# Altium schematic symbol library Capacitor.SchLib: 735 symbols (part 20 of 20)
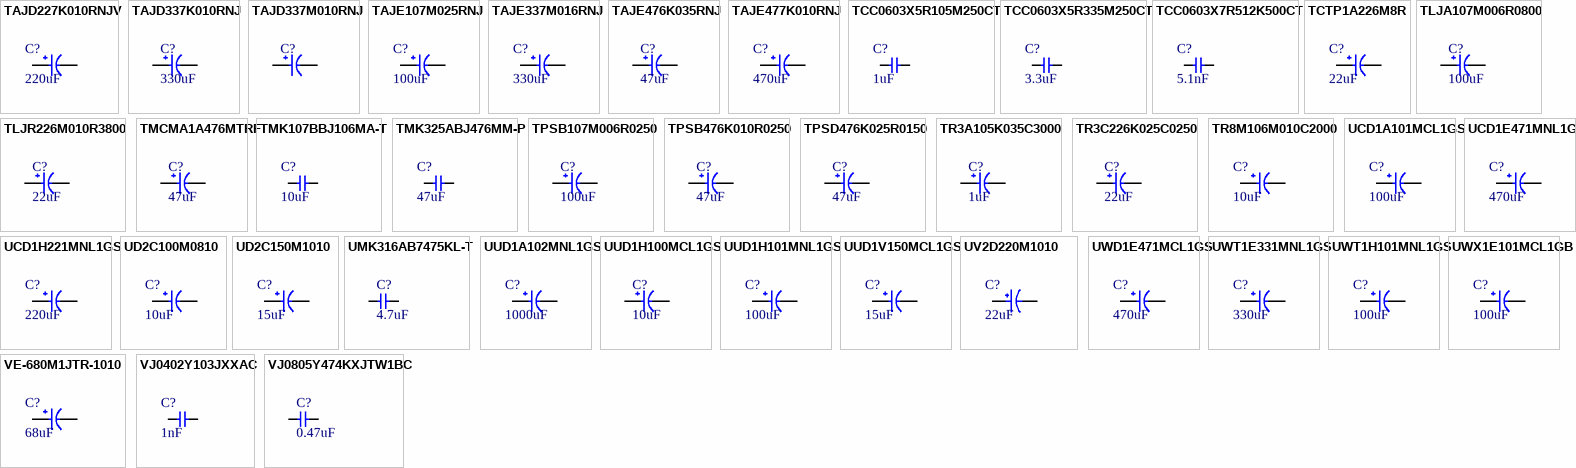
[diagram p37: symbols TAJD227K010RNJV to VJ0805Y474KXJTW1BC]

## UUD1H101MNL1GS
designator C?, comment 100uF
CAP ALUM 100UF 20% 50V SMD; Manufacturer: Nichicon; Manufacturer Part Number: UUD1H101MNL1GS; Dielectric Material: Aluminium; Ripple Current: 300mA; Life (Hours): 5000Hour; Impedance: 340mR; Leakage Current: 3uA; Dissipation Factor: 0.14%; Lead Diameter: 1.1mm; Item Type: Capacitor; Supplier 1: Digi-Key; RoHS: Yes; Category: Aluminum Electrolytic Capacitors; Pricing 1: 1=0.62000, 10=0.44000, 50=0.33300, 100=0.29000 (USD); Case/Package: Radial; Number of Pins: 2; Min Operating Temperature: -55°C; Max Operating Temperature: 105°C; Tolerance: 20%; Capacitance: 100uF; Ripple Current (AC): 300mA; Voltage Rating (DC): 50V; Package Quantity: 500; Packaging: Tape and Reel; Voltage Rating: 50V; Termination: SMD/SMT; Voltage: 50V; Series: UD; Construction: Cylindrical; Diameter: 8mm; Length: 10mm; Height: 10mm; Lead Pitch: 3.1mm; Height - Seated (Max): 0.394inch; Radiation Hardening: No; REACH SVHC: No SVHC; Lead Free: Lead Free; RoHS Compliant: Yes; ComponentLink1URL: https://datasheet.ciiva.com/6002/66055-6002224.pdf?src-supplier=Farnell; ComponentLink1Description: https://datasheet.ciiva.com/6002/66055-6002224.pdf?src-supplier=Farnell; ComponentLink2URL: https://datasheet.ciiva.com/11781/0900766b80fa39e7-11781901.pdf?src-supplier=RSComponents; ComponentLink2Description: https://datasheet.ciiva.com/11781/0900766b80fa39e7-11781901.pdf?src-supplier=RSComponents; ComponentLink3URL: https://datasheet.ciiva.com/97/e-ud-97939.pdf?src-supplier=Digi-Key; ComponentLink3Description: https://datasheet.ciiva.com/97/e-ud-97939.pdf?src-supplier=Digi-Key; ComponentLink4URL: https://datasheet.ciiva.com/97/e-ud-97940.pdf?src-supplier=Digi-Key; ComponentLink4Description: https://datasheet.ciiva.com/97/e-ud-97940.pdf?src-supplier=Digi-Key; ComponentLink5URL: https://datasheet.ciiva.com/97/e-ud-97941.pdf?src-supplier=Digi-Key; ComponentLink5Description: https://datasheet.ciiva.com/97/e-ud-97941.pdf?src-supplier=Digi-Key; ComponentLink6URL: https://datasheet.ciiva.com/28458/e-ud-28458117.pdf?src-supplier=Element14; ComponentLink6Description: https://datasheet.ciiva.com/28458/e-ud-28458117.pdf?src-supplier=Element14; ComponentLink7URL: https://datasheet.ciiva.com/28458/1910936-28458133.pdf?src-supplier=Element14; ComponentLink7Description: https://datasheet.ciiva.com/28458/1910936-28458133.pdf?src-supplier=Element14; ComponentLink8URL: https://datasheet.ciiva.com/5362/e-ud-5362134.pdf?src-supplier=Mouser; ComponentLink8Description: https://datasheet.ciiva.com/5362/e-ud-5362134.pdf?src-supplier=Mouser; ComponentLink9URL: https://datasheet.ciiva.com/7781/66055-7781450.pdf?src-supplier=Element14; ComponentLink9Description: https://datasheet.ciiva.com/7781/66055-7781450.pdf?src-supplier=Element14; ComponentLink10URL: https://datasheet.ciiva.com/17354/e-ud-17354671.pdf?src-supplier=Avnet+Europe; ComponentLink10Description: https://datasheet.ciiva.com/17354/e-ud-17354671.pdf?src-supplier=Avnet+Europe; Supplier Part Number 1: 493-2306-6-ND; LCSC Part Number: C116241
footprint UUD-100uF-8mmDia (0.327" L x 0.327" W (8.30mm x 8.30mm))
pins: 1, 2

## UUD1V150MCL1GS
designator C?, comment 15uF
CAP ALUM 15UF 20% 35V SMD; Manufacturer: Nichicon; Manufacturer Part Number: UUD1V150MCL1GS; Dielectric Material: Aluminium; Ripple Current: 150mA; Impedance: 760mR; Leakage Current: 5.25uA; Life (Hours): 2000Hour; Item Type: Capacitor; Supplier 1: Arrow Electronics; RoHS: Yes; Category: Aluminum Electrolytic Capacitors; Stock 1: 1; Pricing 1: 1=0.1001 (USD); Case/Package: Radial; Pins: 2; Min Operating Temperature: -55°C; Max Operating Temperature: 105°C; Package Quantity: 1000; Voltage Rating (DC): 35V; Tolerance: 20%; Packaging: Tape and Reel; Value: 15uF; Voltage Rating: 35V; Termination: SMD/SMT; Series: UD; Construction: Cylindrical; Diameter: 5mm; Length: 5.8mm; Height: 5.8mm; Radiation Hardening: No; Lead Free: Lead Free; RoHS Compliant: Yes; ComponentLink1URL: https://datasheet.ciiva.com/96/e-ud-96810.pdf?src-supplier=Digi-Key; ComponentLink1Description: https://datasheet.ciiva.com/96/e-ud-96810.pdf?src-supplier=Digi-Key; ComponentLink2URL: https://datasheet.ciiva.com/96/e-ud-96811.pdf?src-supplier=Digi-Key; ComponentLink2Description: https://datasheet.ciiva.com/96/e-ud-96811.pdf?src-supplier=Digi-Key; ComponentLink3URL: https://datasheet.ciiva.com/96/e-ud-96812.pdf?src-supplier=Digi-Key; ComponentLink3Description: https://datasheet.ciiva.com/96/e-ud-96812.pdf?src-supplier=Digi-Key; Supplier Part Number 1: UUD1V150MCL1GS; LCSC Part Number: C445253
footprint UUD1V150MCL1GS
pins: 1, 2

## UV2D220M1010
designator C?, comment 22uF
22uF 200V ±20% SMD,D10xL10.2mm Aluminum Electrolytic Capacitors - SMD ROHS; Manufacturer: Honor Elec; Manufacturer Part Number: UV2D220M1010; ComponentLink1URL: https://www.lcsc.com/product-detail/Aluminum-Electrolytic-Capacitors-SMD_Honor-Elec-UV2D220M1010_C88689.html; ComponentLink1Description: LCSC; LCSC Part Number: C88689; Item Type: Capacitor; Package: SMD 10*10.2mm
footprint UV2D220M1010
pins: 1, 2

## UWD1E471MCL1GS
designator C?, comment 470uF
CAP ALUM 470UF 20% 25V SMD; Manufacturer: Nichicon; Manufacturer Part Number: UWD1E471MCL1GS; Material: Aluminium; Ripple Current: 670mA; Impedance: 90mR; Leakage Current: 52.8uA; Life (Hours): 5000Hour; Dissipation Factor: 0.16%; Item Type: Capacitor; Supplier 1: Digi-Key; RoHS: Yes; Category: Aluminum Electrolytic Capacitors; Pricing 1: 1=0.87000, 10=0.64000, 50=0.51200, 100=0.43880 (USD); Mount: Surface Mount; Case/Package: SMD/SMT; Contact Plating: Tin; Min Operating Temperature: -55°C; Max Operating Temperature: 105°C; Capacitance: 470uF; Tolerance: 20%; Package Quantity: 1; Voltage Rating: 25V; Packaging: Tape and Reel; Voltage Rating (DC): 25V; Termination: SMD/SMT; Voltage: 25V; Features: General Purpose; Series: WD; Construction: Cylindrical; Diameter: 10mm; Length: 10mm; Height: 10mm; Height - Seated (Max): 0.394inch; Lead Pitch: 4.5mm; Radiation Hardening: No; Lead Free: Lead Free; RoHS Compliant: Yes; ComponentLink1URL: https://datasheet.ciiva.com/11783/0900766b8080ae55-11783126.pdf?src-supplier=RSComponents; ComponentLink1Description: https://datasheet.ciiva.com/11783/0900766b8080ae55-11783126.pdf?src-supplier=RSComponents; ComponentLink2URL: https://datasheet.ciiva.com/17523/e-wd-17523158.pdf?src-supplier=Avnet+Europe; ComponentLink2Description: https://datasheet.ciiva.com/17523/e-wd-17523158.pdf?src-supplier=Avnet+Europe; ComponentLink3URL: https://datasheet.ciiva.com/11684/e-wd-11684711.pdf?src-supplier=Avnet; ComponentLink3Description: https://datasheet.ciiva.com/11684/e-wd-11684711.pdf?src-supplier=Avnet; ComponentLink4URL: https://datasheet.ciiva.com/5362/e-wd-5362606.pdf?src-supplier=Mouser; ComponentLink4Description: https://datasheet.ciiva.com/5362/e-wd-5362606.pdf?src-supplier=Mouser; ComponentLink5URL: https://datasheet.ciiva.com/16512/e-wd-16512734.pdf?src-supplier=Future+Electronics; ComponentLink5Description: https://datasheet.ciiva.com/16512/e-wd-16512734.pdf?src-supplier=Future+Electronics; ComponentLink6URL: https://datasheet.ciiva.com/15036/e-wd-15036959.pdf?src-supplier=Digi-Key; ComponentLink6Description: https://datasheet.ciiva.com/15036/e-wd-15036959.pdf?src-supplier=Digi-Key; ComponentLink7URL: https://datasheet.ciiva.com/41751/404632-da-01-en-smd-aluminium-kondensator-470uf-25v-41751238.pdf?src-supplier=Conrad; ComponentLink7Description: https://datasheet.ciiva.com/41751/404632-da-01-en-smd-aluminium-kondensator-470uf-25v-41751238.pdf?src-supplier=Conrad; Supplier Part Number 1: 493-9671-1-ND; LCSC Part Number: C251022
footprint UWD-470uF-10mmDia (0.406" L x 0.406" W (10.30mm x 10.30mm))
pins: 1, 2

## UWT1E331MNL1GS
designator C?, comment 330uF
CAP ALUM 330UF 20% 25V SMD; Manufacturer: Nichicon; Manufacturer Part Number: UWT1E331MNL1GS; Item Type: Capacitor; Dielectric Material: 158ConductorMaterial; Polarity: 5066Direction; Supplier: Digikey; LCSC Part Number: C445067; RoHS: Yes; Stock: 31265; Pricing: 1=0.53, 10=0.353, 50=0.2762, 100=0.2506 (USD); Pins: 2NUMBER; Lead Free: 5697LeadFree; ComponentLink1URL: https://datasheet.ciiva.com/30522/getdatasheetpartid-457641-30522227.pdf?src-supplier=Verical; ComponentLink1Description: https://datasheet.ciiva.com/30522/getdatasheetpartid-457641-30522227.pdf?src-supplier=Verical; ComponentLink2URL: https://datasheet.ciiva.com/97/e-wt-97107.pdf?src-supplier=Digikey; ComponentLink2Description: https://datasheet.ciiva.com/97/e-wt-97107.pdf?src-supplier=Digikey; ComponentLink3URL: https://datasheet.ciiva.com/97/e-wt-97108.pdf?src-supplier=Digikey; ComponentLink3Description: https://datasheet.ciiva.com/97/e-wt-97108.pdf?src-supplier=Digikey; ComponentLink4URL: https://datasheet.ciiva.com/97/e-wt-97109.pdf?src-supplier=Digikey; ComponentLink4Description: https://datasheet.ciiva.com/97/e-wt-97109.pdf?src-supplier=Digikey; ComponentLink5URL: https://datasheet.ciiva.com/11782/0900766b80649b51-11782007.pdf?src-supplier=Rs; ComponentLink5Description: https://datasheet.ciiva.com/11782/0900766b80649b51-11782007.pdf?src-supplier=Rs; ComponentLink6URL: https://datasheet.ciiva.com/11686/e-wt-11686502.pdf?src-supplier=Avnet; ComponentLink6Description: https://datasheet.ciiva.com/11686/e-wt-11686502.pdf?src-supplier=Avnet; ComponentLink7URL: https://datasheet.ciiva.com/7851/e-wt-7851757.pdf?src-supplier=Element14; ComponentLink7Description: https://datasheet.ciiva.com/7851/e-wt-7851757.pdf?src-supplier=Element14; ComponentLink8URL: https://datasheet.ciiva.com/16502/e-wt-16502936.pdf?src-supplier=Future+Electronics; ComponentLink8Description: https://datasheet.ciiva.com/16502/e-wt-16502936.pdf?src-supplier=Future+Electronics
footprint UWT1E331MNL1GS
pins: 1, 2

## UWT1H101MNL1GS
designator C?, comment 100uF
CAP ALUM 100UF 20% 50V SMD; Manufacturer: Nichicon; Manufacturer Part Number: UWT1H101MNL1GS; Dielectric Material: Aluminium; Ripple Current: 140mA; Leakage Current: 3uA; Life (Hours): 1000Hour; Dissipation Factor: 0.14%; Item Type: Capacitor; Supplier 1: Digi-Key; Stock 1: 24169; Pricing 1: 1=0.57, 10=0.405, 50=0.3058, 100=0.2664 (USD); Mount: Surface Mount; Case/Package: Radial; Number of Pins: 2; Min Operating Temperature: -55°C; Max Operating Temperature: 105°C; Capacitance: 100uF; Tolerance: 20%; Package Quantity: 500; Voltage Rating: 50V; Packaging: Tape and Reel; Ripple Current (AC): 140mA; Voltage Rating (DC): 50V; Termination: SMD/SMT; Voltage: 50V; Series: WT; Construction: Cylindrical; Diameter: 8mm; Length: 10mm; Height: 10mm; Height - Seated (Max): 0.413inch; Radiation Hardening: No; REACH SVHC: No SVHC; Lead Free: Lead Free; RoHS Compliant: Yes; ComponentLink1URL: http://www.farnell.com/datasheets/2100058.pdf?src-supplier=Element14; ComponentLink1Description: http://www.farnell.com/datasheets/2100058.pdf?src-supplier=Element14; ComponentLink2URL: http://www.farnell.com/datasheets/2576809.pdf?src-supplier=Element14; ComponentLink2Description: http://www.farnell.com/datasheets/2576809.pdf?src-supplier=Element14; ComponentLink3URL: http://www.nichicon.co.jp/english/products/pdfs/e-ch_ref.pdf?src-supplier=Digi-Key; ComponentLink3Description: http://www.nichicon.co.jp/english/products/pdfs/e-ch_ref.pdf?src-supplier=Digi-Key; ComponentLink4URL: http://www.mouser.com/ds/2/293/e-wt-30307.pdf?src-supplier=Mouser; ComponentLink4Description: http://www.mouser.com/ds/2/293/e-wt-30307.pdf?src-supplier=Mouser; ComponentLink5URL: http://uk.rs-online.com/webdocs/13ec/0900766b813ecfdc.pdf?src-supplier=RSComponents; ComponentLink5Description: http://uk.rs-online.com/webdocs/13ec/0900766b813ecfdc.pdf?src-supplier=RSComponents; ComponentLink6URL: http://www.nichicon.co.jp/english/products/pdfs/e-wt.pdf?src-supplier=Avnet; ComponentLink6Description: http://www.nichicon.co.jp/english/products/pdfs/e-wt.pdf?src-supplier=Avnet; ComponentLink7URL: http://products.nichicon.co.jp/en/pdf/XJA043/e-wt.pdf?src-supplier=Future+Electronics; ComponentLink7Description: http://products.nichicon.co.jp/en/pdf/XJA043/e-wt.pdf?src-supplier=Future+Electronics; ComponentLink8URL: http://www.nichicon.co.jp/english/products/pdfs/e-wt.pdf?src-supplier=Avnet+Europe; ComponentLink8Description: http://www.nichicon.co.jp/english/products/pdfs/e-wt.pdf?src-supplier=Avnet+Europe; Supplier Part Number 1: 493-2226-1-ND; LCSC Part Number: C445063
footprint UWT1H101MNL1GS_
pins: 1, 2

## UWX1E101MCL1GB
designator C?, comment 100uF
CAP ALUM 100UF 20% 25V SMD; Manufacturer: Nichicon; Manufacturer Part Number: UWX1E101MCL1GB; Dielectric Material: Aluminium; Ripple Current: 110mA; Polarity: Polar; Leakage Current: 3uA; Life (Hours): 2000Hour; Dissipation Factor: 0.14%; Lead Diameter: 0.8mm; Item Type: Capacitor; Supplier 1: Digi-Key; Stock 1: 30613; Pricing 1: 1=0.43, 10=0.301, 50=0.211, 100=0.1808, 500=0.13558 (USD); Mount: Surface Mount; Case/Package: Radial; Number of Pins: 2; Weight: 0.01lb; Min Operating Temperature: -40°C; Max Operating Temperature: 85°C; Capacitance: 100uF; Tolerance: 20%; Ripple Current (AC): 110mA; Voltage Rating: 25V; Packaging: Tape and Reel; Package Quantity: 1000; Voltage Rating (DC): 25V; Termination: SMD/SMT; Voltage: 25V; Series: WX; Construction: Cylindrical; Diameter: 8mm; Length: 5.4mm; Width: 0.25inch; Height: 5.4mm; Lead Pitch: 2.3mm; Height - Seated (Max): 0.213inch; Radiation Hardening: No; REACH SVHC: No SVHC; Lead Free: Lead Free; RoHS Compliant: Yes; ComponentLink1URL: http://nichicon-us.com/english/products/pdfs/e-uwx.pdf?src-supplier=Digi-Key; ComponentLink1Description: http://nichicon-us.com/english/products/pdfs/e-uwx.pdf?src-supplier=Digi-Key; ComponentLink2URL: http://www.nichicon.co.jp/english/products/pdfs/e-ch_ref.pdf?src-supplier=Mouser; ComponentLink2Description: http://www.nichicon.co.jp/english/products/pdfs/e-ch_ref.pdf?src-supplier=Mouser; ComponentLink3URL: http://www.nichicon.co.jp/english/products/pdfs/e-wx.pdf?src-supplier=Avnet; ComponentLink3Description: http://www.nichicon.co.jp/english/products/pdfs/e-wx.pdf?src-supplier=Avnet; ComponentLink4URL: http://uk.rs-online.com/webdocs/0fa3/0900766b80fa3a90.pdf?src-supplier=RSComponents; ComponentLink4Description: http://uk.rs-online.com/webdocs/0fa3/0900766b80fa3a90.pdf?src-supplier=RSComponents; ComponentLink5URL: http://nichicon-us.com/english/products/pdfs/e-wx.pdf?src-supplier=Future+Electronics; ComponentLink5Description: http://nichicon-us.com/english/products/pdfs/e-wx.pdf?src-supplier=Future+Electronics; ComponentLink6URL: http://www.nichicon.co.jp/english/products/pdfs/e-ch_ref.pdf?src-supplier=Avnet+Europe; ComponentLink6Description: http://www.nichicon.co.jp/english/products/pdfs/e-ch_ref.pdf?src-supplier=Avnet+Europe; ComponentLink7URL: http://www.farnell.com/datasheets/2364658.pdf?src-supplier=Element14; ComponentLink7Description: http://www.farnell.com/datasheets/2364658.pdf?src-supplier=Element14; Supplier Part Number 1: 493-2113-6-ND; Supplier 2: Digi-Key; RoHS: Yes; Category: Aluminum Electrolytic Capacitors; Stock 2: 25010; Pricing 2: 1=0.43000, 10=0.30100, 50=0.21100, 100=0.18080, 500=0.13558 (USD); ComponentLink8URL: https://datasheet.ciiva.com/11778/0900766b80fa3a90-11778418.pdf?src-supplier=RSComponents; ComponentLink8Description: https://datasheet.ciiva.com/11778/0900766b80fa3a90-11778418.pdf?src-supplier=RSComponents; ComponentLink9URL: https://datasheet.ciiva.com/17527/e-wx-17527624.pdf?src-supplier=Avnet+Europe; ComponentLink9Description: https://datasheet.ciiva.com/17527/e-wx-17527624.pdf?src-supplier=Avnet+Europe; ComponentLink10URL: https://datasheet.ciiva.com/5361/e-wx-11809-5361100.pdf?src-supplier=Mouser; ComponentLink10Description: https://datasheet.ciiva.com/5361/e-wx-11809-5361100.pdf?src-supplier=Mouser; ComponentLink11URL: https://datasheet.ciiva.com/28458/1912851-28458684.pdf?src-supplier=Element14; ComponentLink11Description: https://datasheet.ciiva.com/28458/1912851-28458684.pdf?src-supplier=Element14; ComponentLink12URL: https://datasheet.ciiva.com/96/e-wx-96650.pdf?src-supplier=Digi-Key; ComponentLink12Description: https://datasheet.ciiva.com/96/e-wx-96650.pdf?src-supplier=Digi-Key; ComponentLink13URL: https://datasheet.ciiva.com/96/e-wx-96651.pdf?src-supplier=Digi-Key; ComponentLink13Description: https://datasheet.ciiva.com/96/e-wx-96651.pdf?src-supplier=Digi-Key; ComponentLink14URL: https://datasheet.ciiva.com/96/e-wx-96652.pdf?src-supplier=Digi-Key; ComponentLink14Description: https://datasheet.ciiva.com/96/e-wx-96652.pdf?src-supplier=Digi-Key; ComponentLink15URL: https://datasheet.ciiva.com/11687/e-wx-11687148.pdf?src-supplier=Avnet; ComponentLink15Description: https://datasheet.ciiva.com/11687/e-wx-11687148.pdf?src-supplier=Avnet; ComponentLink16URL: https://datasheet.ciiva.com/16512/e-wx-16512638.pdf?src-supplier=Future+Electronics; ComponentLink16Description: https://datasheet.ciiva.com/16512/e-wx-16512638.pdf?src-supplier=Future+Electronics; Supplier Part Number 2: 493-2113-1-ND; LCSC Part Number: C125982
footprint UWX1E101MCL1GB_
pins: 1, 2

## VE-680M1JTR-1010
designator C?, comment 68uF
68uF 63V ±20% SMD,D10xL10mm Aluminum Electrolytic Capacitors - SMD ROHS; Manufacturer: Lelon; Manufacturer Part Number: VE-680M1JTR-1010; Package: SMD,D10xL10mm; LCSC Part Number: C249560; Item Type: Capacitor; ComponentLink1Description: LCSC; ComponentLink1URL: https://www.lcsc.com/product-detail/Aluminum-Electrolytic-Capacitors-SMD_Lelon-VE-680M1JTR-1010_C249560.html
footprint VE-680M1JTR-1010
pins: 1, 2

## VJ0402Y103JXXAC
designator C?, comment 1nF
CAP CER 10000PF 25V X7R 0402; Manufacturer: Vishay Vitramon; Manufacturer Part Number: VJ0402Y103JXXAC; Capacitance: 10nF; Tolerance: 5%; Item Type: Capacitor; Supplier 1: Digi-Key; Stock 1: 65000; Pricing 1: 5000=0.08639, 10000=0.08131, 15000=0.07877, 25000=0.07623, 50000=0.07115 (USD); Mount: Surface Mount; Case/Package: 0402; Number of Pins: 2; Case Code (Imperial): 0402; Case Code (Metric): 1005; Min Operating Temperature: -55°C; Max Operating Temperature: 150°C; Dielectric: X7R; Packaging: Tape and Reel; Voltage Rating: 25V; Voltage Rating (DC): 25V; Termination: SMD/SMT; Series: VJ COMM; Construction: Flat; Length: 1mm; Width: 0.5mm; Height: 0.6mm; Depth: 0.5mm; Radiation Hardening: No; Lead Free: Lead Free; RoHS Compliant: Yes; ComponentLink1URL: http://www.vishay.com/docs/45199/vjcommercialseries.pdf?src-supplier=Digi-Key; ComponentLink1Description: http://www.vishay.com/docs/45199/vjcommercialseries.pdf?src-supplier=Digi-Key; ComponentLink2URL: http://www.mouser.com/ds/2/427/vjcommercialseries-222796.pdf?src-supplier=Mouser; ComponentLink2Description: http://www.mouser.com/ds/2/427/vjcommercialseries-222796.pdf?src-supplier=Mouser; ComponentLink3URL: http://www.vishay.com/docs/45199/commseri.pdf?src-supplier=Avnet; ComponentLink3Description: http://www.vishay.com/docs/45199/commseri.pdf?src-supplier=Avnet; ComponentLink4URL: http://components.arrow.com/part/dataview/3604811S5190749N4403?src-supplier=Arrow+Electronics; ComponentLink4Description: http://components.arrow.com/part/dataview/3604811S5190749N4403?src-supplier=Arrow+Electronics; ComponentLink5URL: http://components.arrow.com/part/dataview/0323_01555941?src-supplier=Arrow+Europe; ComponentLink5Description: http://components.arrow.com/part/dataview/0323_01555941?src-supplier=Arrow+Europe; ComponentLink6URL: http://www.onlinecomponents.com/datasheet/vj0402y103jxxac.aspx?p=35767938&src-supplier=Onlinecomponents.com; ComponentLink6Description: http://www.onlinecomponents.com/datasheet/vj0402y103jxxac.aspx?p=35767938&src-supplier=Onlinecomponents.com; ComponentLink7URL: http://www.vishay.com/docs/45040/autospec.pdf?src-supplier=Future+Electronics; ComponentLink7Description: http://www.vishay.com/docs/45040/autospec.pdf?src-supplier=Future+Electronics; ComponentLink8URL: http://www.vishay.com/docs/45199/commseri.pdf?src-supplier=Avnet+Europe; ComponentLink8Description: http://www.vishay.com/docs/45199/commseri.pdf?src-supplier=Avnet+Europe; Supplier Part Number 1: 720-1897-2-ND; LCSC Part Number: C2175851
footprint Cap-0402
pins: 1, 2

## VJ0805Y474KXJTW1BC
designator C?, comment 0.47uF
CAP CER 0.47UF 16V X7R 0805; Manufacturer: Vishay Vitramon; Manufacturer Part Number: VJ0805Y474KXJTW1BC; Item Type: Capacitors; Supplier: Mouser; LCSC Part Number: C2174635; RoHS: Yes; Stock: 5925; Pricing: 1=0.2, 10=0.092, 50=0.092, 100=0.053, 1000=0.048, 10000=0.037 (USD); ComponentLink1URL: https://datasheet.ciiva.com/5416/vjw1bcbascomseries-223529-5416469.pdf?src-supplier=Mouser; ComponentLink1Description: https://datasheet.ciiva.com/5416/vjw1bcbascomseries-223529-5416469.pdf?src-supplier=Mouser
footprint Cap-0805 (SMD 0805)
pins: 1, 2

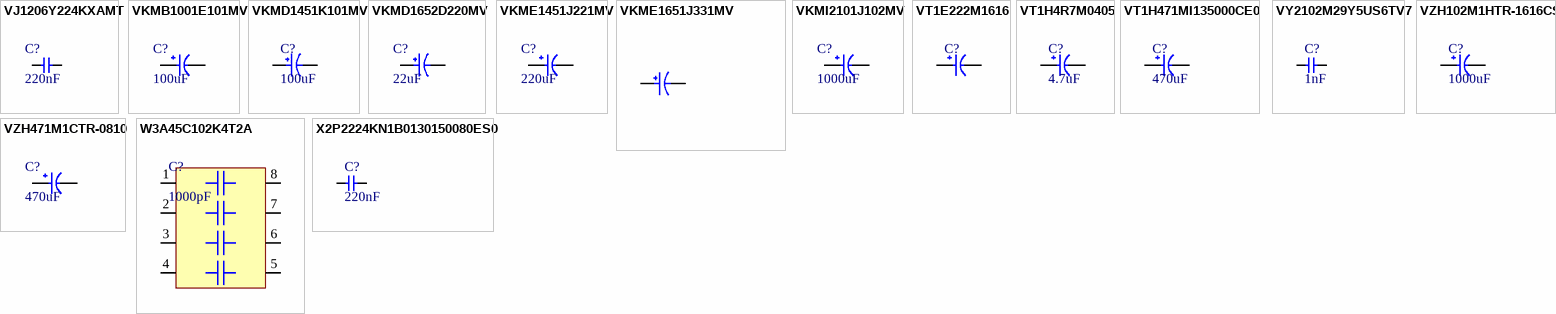
[diagram p18: symbols VJ1206Y224KXAMT to X2P2224KN1B0130150080ES0]

## VJ1206Y224KXAMT
designator C?, comment 220nF
CAP CER 0.22UF 50V X7R 1206; Manufacturer: Vishay Vitramon; Manufacturer Part Number: VJ1206Y224KXAMT; Dielectric Material: Ceramic; Tolerance: 10%; Item Type: Capacitor; Supplier 1: Digi-Key; Stock 1: 5727; Pricing 1: 1=0.57, 10=0.403, 50=0.3044, 100=0.2652, 500=0.19642, 1000=0.16696 (USD); Mount: Surface Mount; Case/Package: 1206; Number of Pins: 2; Case Code (Metric): 3216; Case Code (Imperial): 1206; Min Operating Temperature: -55°C; Max Operating Temperature: 125°C; Capacitance: 220nF; Packaging: Tape and Reel; Package Quantity: 2500; Voltage Rating (DC): 50V; Dielectric: X7R; Series: VJ; Voltage Rating: 50V; Termination: SMD/SMT; Construction: Flat; Length: 3.2mm; Width: 0.063inch; Height: 1.7mm; Height - Seated (Max): 0.067inch; Thickness: 0.067inch; Depth: 1.6mm; RoHS Compliant: Yes; REACH SVHC: Unknown; ComponentLink1URL: http://www.vishay.com/docs/45199/vjcommercialseries.pdf?src-supplier=Digi-Key; ComponentLink1Description: http://www.vishay.com/docs/45199/vjcommercialseries.pdf?src-supplier=Digi-Key; ComponentLink2URL: http://www.vishay.com/docs/45051/vjvitramonpackaging.pdf?src-supplier=Digi-Key; ComponentLink2Description: http://www.vishay.com/docs/45051/vjvitramonpackaging.pdf?src-supplier=Digi-Key; ComponentLink3URL: http://www.mouser.com/ds/2/427/vjcommercialseries-222796.pdf?src-supplier=Mouser; ComponentLink3Description: http://www.mouser.com/ds/2/427/vjcommercialseries-222796.pdf?src-supplier=Mouser; Supplier Part Number 1: 720-1395-1-ND; LCSC Part Number: C2172665
footprint Cap-1206 (SMD 1206)
pins: 1, 2

## VKMB1001E101MV
designator C?, comment 100uF
25V 5mm 10mm 100uF 100kHz SMD,5x10mm Aluminum Electrolytic Cap- SMD ROHS; Manufacturer: Ymin; Manufacturer Part Number: VKMB1001E101MV; Item Type: Capacitor; Value: 100uF; Voltage: 25V; ComponentLink1Description: LCSC; ComponentLink1URL: https://lcsc.com/product-detail/Aluminum-Electrolytic-Capacitors-SMD_Ymin-VKMB1001E101MV_C487322.html; LCSC Part Number: C487322
footprint VKMB1001E101MV_ (25V 5mm 10mm 100uF)
pins: 1, 2

## VKMD1451K101MV
designator C?, comment 100uF
100uF 80V 735mA@100kHz ±20% SMD,D8xL14.5mm Aluminum Electrolytic Capacitors - SMD ROHS; Manufacturer: Ymin; Manufacturer Part Number: VKMD1451K101MV; Package: SMD,D8xL14.5mm; LCSC Part Number: C487409; Item Type: Capacitor; ComponentLink1Description: LCSC; ComponentLink1URL: https://www.lcsc.com/product-detail/Aluminum-Electrolytic-Capacitors-SMD_Ymin-VKMD1451K101MV_C487409.html
footprint VKMD1451K101MV
pins: 1, 2

## VKMD1652D220MV
designator C?, comment 22uF
22uF 200V 320mA@100kHz ±20% SMD,D8xL16.5mm Aluminum Electrolytic Capacitors - SMD ROHS; Manufacturer: Ymin; Manufacturer Part Number: VKMD1652D220MV; Package: SMD,D8xL16.5mm; LCSC Part Number: C487500; Item Type: Electrolytic Capacitor; ComponentLink1Description: LCSC; ComponentLink1URL: https://www.lcsc.com/product-detail/Aluminum-Electrolytic-Capacitors-SMD_Ymin-VKMD1652D220MV_C487500.html
footprint VKMD1652D220MV
pins: 1, 2

## VKME1451J221MV
designator C?, comment 220uF
220uF ±20% 63V 10mm 14.5mm 1.2A 100kHz 10000hrs 105℃ -55℃~+105℃ SMD,10x14.5mm Aluminum Electrolytic Capacitors - SMD RoHS; Manufacturer: Ymin; Package: SMD,10x14.5mm; Capacitance: 220uF; Tolerance: ±20%; Rated Voltage: 63V; φD: 10mm; L: 14.5mm; Ripple Current: 1.2A 100kHz; Lifetime @ Temp: 10000hrs 105℃; Operating Temperature: -55℃~+105℃; LCSC Part Number: C487391; ComponentLink1Description: LCSC; ComponentLink1URL: https://www.lcsc.com/product-detail/Aluminum-Electrolytic-Capacitors-SMD_Ymin-VKME1451J221MV_C487391.html; Item Type: Capacitor
footprint VKME1451J221MV (220uF ±20% 63V 10mm 14.5mm 1.2A 100kHz 10000hrs 105? -55?~+105? SMD,10x14.5mm Aluminum Electrolytic Capacitors - SMD RoHS)
pins: 1, 2

## VKME1651J331MV
designator C?, comment 330uF
330uF 63V 1.58A@100kHz ±20% SMD,D10xL16.5mm Aluminum Electrolytic Capacitors - SMD ROHS; Manufacturer: Ymin; Manufacturer Part Number: VKME1651J331MV; Package: SMD,D10xL16.5mm; LCSC Part Number: C487393; Item Type: Capacitor; ComponentLink1Description: LCSC; ComponentLink1URL: https://www.lcsc.com/product-detail/Aluminum-Electrolytic-Capacitors-SMD_Ymin-VKME1651J331MV_C487393.html
footprint VKME1651J331MV
pins: 1, 2

## VKMI2101J102MV
designator C?, comment 1000uF
1000uF 63V 2.86A@100kHz ±20% SMD,D16xL21mm Aluminum Electrolytic Capacitors - SMD ROHS; Manufacturer: Ymin; Manufacturer Part Number: VKMI2101J102MV; Package: SMD,D16xL21mm; LCSC Part Number: C487399; Item Type: Capacitor; ComponentLink1Description: LCSC; ComponentLink1URL: https://www.lcsc.com/product-detail/Aluminum-Electrolytic-Capacitors-SMD_Ymin-VKMI2101J102MV_C487399.html
footprint VKMI2101J102MV
pins: 1, 2

## VT1E222M1616
designator C?
2200uF 25V 720mA@120Hz ±20% SMD,D16xL16.5mm Aluminum Electrolytic Capacitors - SMD ROHS; Manufacturer: ROQANG; Manufacturer Part Number: VT1E222M1616; Package: SMD,D16xL16.5mm; LCSC Part Number: C239249; Item Type: Capacitor; ComponentLink1Description: LCSC; ComponentLink1URL: https://www.lcsc.com/product-detail/Aluminum-Electrolytic-Capacitors-SMD_ROQANG-VT1E222M1616_C239249.html
footprint VT1E222M1616
pins: 1, 2

## VT1H4R7M0405
designator C?, comment 4.7uF
4.7uF 50V 14mA@120Hz ±20% SMD,D4xL5.4mm Aluminum Electrolytic Capacitors - SMD ROHS; Manufacturer: Roqang; Manufacturer Part Number: VT1H4R7M0405; Supplier: LCSC; LCSC Part Number: C213488; RoHS: No; Item Type: Capacitor
footprint VT1H4R7M0405
pins: 1, 2

## VT1H471MI135000CE0
designator C?, comment 470uF
470uF 50V ±20% SMD,D12.5xL13.5mm Aluminum Electrolytic Capacitors - SMD ROHS; Manufacturer: Changzhou Huawei Elec; Manufacturer Part Number: VT1H471MI135000CE0; Package: Custom; LCSC Part Number: C191227; Item Type: Capacitor; ComponentLink1Description: LCSC; ComponentLink1URL: https://lcsc.com/product-detail/ST-Microelectronics_STMicroelectronics_C87900.html
footprint VT1H471MI135000CE0
pins: 1, 2

## VY2102M29Y5US6TV7
designator C?, comment 1nF
CAP CER 1000PF 440VAC Y5U RADIAL; Manufacturer: Vishay BCcomponents; Manufacturer Part Number: VY2102M29Y5US6TV7; Item Type: Capacitors; Material: 4241ConductorMaterial; Voltage Rating: 1kV; Supplier: Mouser; LCSC Part Number: C511063; RoHS: Yes; Stock: 17875; Pricing: 1=0.33, 10=0.2, 50=0.2, 100=0.129, 1000=0.082, 10000=0.07 (USD); RoHS Compliant: 5897YesNo; ComponentLink1URL: https://datasheet.ciiva.com/11789/0900766b80fa7d12-11789611.pdf?src-supplier=Rs; ComponentLink1Description: https://datasheet.ciiva.com/11789/0900766b80fa7d12-11789611.pdf?src-supplier=Rs; ComponentLink2URL: https://datasheet.ciiva.com/15164/getdatasheetpartid-169624-15164808.pdf?src-supplier=Verical; ComponentLink2Description: https://datasheet.ciiva.com/15164/getdatasheetpartid-169624-15164808.pdf?src-supplier=Verical; ComponentLink3URL: https://datasheet.ciiva.com/184/vy2series-184358.pdf?src-supplier=Digikey; ComponentLink3Description: https://datasheet.ciiva.com/184/vy2series-184358.pdf?src-supplier=Digikey
footprint VY2102M29Y5US6TV7
pins: 1, 2

## VZH102M1HTR-1616CS
designator C?, comment 1000uF
1000uF 50V ±20% SMD,D16xL16.5mm Aluminum Electrolytic Capacitors - SMD ROHS; Manufacturer: Surge Components; Manufacturer Part Number: VZH102M1HTR-1616CS; Supplier: Future Electronics; LCSC Part Number: C5266058; RoHS: No; Stock: 600; Pricing: 200=0.675, 600=0.645, 800=0.64, 2000=0.62, 3000=0.6 (USD); Item Type: Capacitors
footprint VZH102M1HTR-1616
pins: 1, 2

## VZH471M1CTR-0810
designator C?, comment 470uF
470uF 16V ±20% SMD,D8xL10mm Aluminum Electrolytic Capacitors - SMD ROHS; Manufacturer: Lelon; Manufacturer Part Number: VZH471M1CTR-0810; Package: SMD,D8xL10mm; LCSC Part Number: C164069; Item Type: Capacitor; ComponentLink1Description: LCSC; ComponentLink1URL: https://www.lcsc.com/product-detail/Aluminum-Electrolytic-Capacitors-SMD_Lelon-VZH471M1CTR-0810_C164069.html
footprint VZH471M1CTR-0810
pins: 1, 2

## W3A45C102K4T2A
designator C?, comment 1000pF
CAP ARRAY 1000PF 50V X7R 0612; Manufacturer: Kyocera AVX; Manufacturer Part Number: W3A45C102K4T2A; Item Type: Capacitors; Dielectric Material: Ceramic; Value: 1nF; Tolerance: 10%; Number of Elements: 4; Circuit Type: Isolated; Supplier: Digikey; RoHS: Yes; Stock: 22810; Pricing: 1=0.26, 10=0.157, 100=0.104, 1000=0.07444 (USD); Mounting Technology: Surface Mount; Case/Package: 0612; Case Code (Imperial): 0612; Case Code (Metric): 1632; Min Operating Temperature: -55°C; Max Operating Temperature: 125°C; Voltage Rating: 50V; Packaging: Tape and Reel; Dielectric: X7R; Termination: SMD/SMT; Number of Capacitors: 4; Series: IPC; Construction: Flat; Length: 3.2mm; Width: 1.6mm; Height: 1.35mm; Terminal Pitch: 0.76mm; Ratings: AEC-Q200; Lead Free: Lead Free; RoHS Compliant: Yes; ComponentLink1URL: https://datasheet.ciiva.com/2987/caparray-2987377.pdf?src-supplier=Avnet; ComponentLink1Description: https://datasheet.ciiva.com/2987/caparray-2987377.pdf?src-supplier=Avnet; ComponentLink2URL: https://datasheet.ciiva.com/15375/caparray-15375372.pdf?src-supplier=Mouser; ComponentLink2Description: https://datasheet.ciiva.com/15375/caparray-15375372.pdf?src-supplier=Mouser
footprint W3A45C102K4T2A
pins: 1 С 1, 2 С 2, 3 С 3, 4 С 4, 5 С 4, 6 С 3, 7 С 2, 8 С 1

## X2P2224KN1B0130150080ES0
designator C?, comment 220nF
220nF ±10% X2 275V Plugin,P=10mm Suppression Capacitors ROHS; Manufacturer: STE; Manufacturer Part Number: X2P2224KN1B0130150080ES0; Package: Plugin,P=10mm; LCSC Part Number: C286022; Item Type: Suppression Capacitor; ComponentLink1Description: LCSC; ComponentLink1URL: https://www.lcsc.com/product-detail/Suppression-Capacitors_STE-Songtian-Elec-X2P2224KN1B0130150080ES0_C286022.html
footprint X2P2224KN1B0130150080ES0
pins: 1, 2